# Altium integrated library VIETTIEN.IntLib: 194 symbols (part 8 of 9)

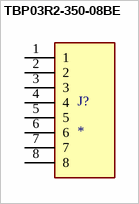
[diagram p161: symbol TBP03R2-350-08BE]

## TBP03R2-350-08BE
designator J?
2~24 Poles, Pluggable, Receptacle, Vertical, 3.50 Pitch, Terminal Block Connector; MF: Same Sky; MP: TBP03R2-350-08BE; SnapEDA_Link: https://www.snapeda.com/parts/TBP03R2-350-08BE/Same+Sky/view-part/?ref=snap; Package: None; Value: *; Check_prices: https://www.snapeda.com/parts/TBP03R2-350-08BE/Same+Sky/view-part/?ref=eda
footprint CUI_TBP03R2-350-08BE
pins: 1, 2, 3, 4, 5, 6, 7, 8


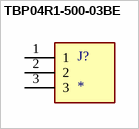
[diagram p162: symbol TBP04R1-500-03BE]

## TBP04R1-500-03BE
designator J?
Terminal Block - Domino - 3 pin; MF: Same Sky; MP: TBP04R1-500-03BE; SnapEDA_Link: https://www.snapeda.com/parts/TBP04R1-500-03BE/Same+Sky/view-part/?ref=snap; Package: None; Value: *; Check_prices: https://www.snapeda.com/parts/TBP04R1-500-03BE/Same+Sky/view-part/?ref=eda
footprint CUI_TBP04R1-500-03BE
pins: 1, 2, 3


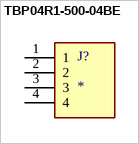
[diagram p163: symbol TBP04R1-500-04BE]

## TBP04R1-500-04BE
designator J?
2~24 Poles, Pluggable, Receptacle, Horizontal, 5.0 Pitch, Terminal Block Connector; MF: Same Sky; MP: TBP04R1-500-04BE; SnapEDA_Link: https://www.snapeda.com/parts/TBP04R1-500-04BE/Same+Sky/view-part/?ref=snap; Package: None; Value: *; Check_prices: https://www.snapeda.com/parts/TBP04R1-500-04BE/Same+Sky/view-part/?ref=eda
footprint CUI_TBP04R1-500-04BE
pins: 1, 2, 3, 4


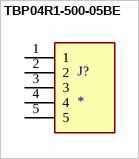
[diagram p164: symbol TBP04R1-500-05BE]

## TBP04R1-500-05BE
designator J?
2~24 Poles, Pluggable, Receptacle, Horizontal, 5.0 Pitch, Terminal Block Connector; MF: Same Sky; MP: TBP04R1-500-05BE; SnapEDA_Link: https://www.snapeda.com/parts/TBP04R1-500-05BE/Same+Sky/view-part/?ref=snap; Package: None; Value: *; Check_prices: https://www.snapeda.com/parts/TBP04R1-500-05BE/Same+Sky/view-part/?ref=eda
footprint CUI_TBP04R1-500-05BE
pins: 1, 2, 3, 4, 5


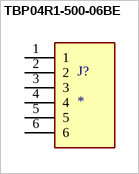
[diagram p165: symbol TBP04R1-500-06BE]

## TBP04R1-500-06BE
designator J?
2~24 Poles, Pluggable, Receptacle, Horizontal, 5.0 Pitch, Terminal Block Connector; MF: Same Sky; MP: TBP04R1-500-06BE; SnapEDA_Link: https://www.snapeda.com/parts/TBP04R1-500-06BE/Same+Sky/view-part/?ref=snap; Package: None; Value: *; Check_prices: https://www.snapeda.com/parts/TBP04R1-500-06BE/Same+Sky/view-part/?ref=eda
footprint CUI_TBP04R1-500-06BE
pins: 1, 2, 3, 4, 5, 6


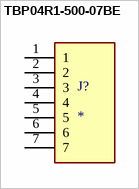
[diagram p166: symbol TBP04R1-500-07BE]

## TBP04R1-500-07BE
designator J?
2~24 Poles, Pluggable, Receptacle, Horizontal, 5.0 Pitch, Terminal Block Connector; MF: Same Sky; MP: TBP04R1-500-07BE; SnapEDA_Link: https://www.snapeda.com/parts/TBP04R1-500-07BE/Same+Sky/view-part/?ref=snap; Package: None; Value: *; Check_prices: https://www.snapeda.com/parts/TBP04R1-500-07BE/Same+Sky/view-part/?ref=eda
footprint CUI_TBP04R1-500-07BE
pins: 1, 2, 3, 4, 5, 6, 7


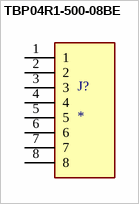
[diagram p167: symbol TBP04R1-500-08BE]

## TBP04R1-500-08BE
designator J?
2~24 Poles, Pluggable, Receptacle, Horizontal, 5.0 Pitch, Terminal Block Connector; MF: Same Sky; MP: TBP04R1-500-08BE; SnapEDA_Link: https://www.snapeda.com/parts/TBP04R1-500-08BE/Same+Sky/view-part/?ref=snap; Package: None; Value: *; Check_prices: https://www.snapeda.com/parts/TBP04R1-500-08BE/Same+Sky/view-part/?ref=eda
footprint CUI_TBP04R1-500-08BE
pins: 1, 2, 3, 4, 5, 6, 7, 8


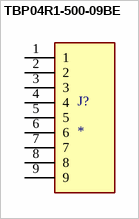
[diagram p168: symbol TBP04R1-500-09BE]

## TBP04R1-500-09BE
designator J?
2~24 Poles, Pluggable, Receptacle, Horizontal, 5.0 Pitch, Terminal Block Connector; MF: Same Sky; MP: TBP04R1-500-09BE; SnapEDA_Link: https://www.snapeda.com/parts/TBP04R1-500-09BE/Same+Sky/view-part/?ref=snap; Package: None; Value: *; Check_prices: https://www.snapeda.com/parts/TBP04R1-500-09BE/Same+Sky/view-part/?ref=eda
footprint CUI_TBP04R1-500-09BE
pins: 1, 2, 3, 4, 5, 6, 7, 8, 9


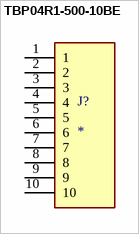
[diagram p169: symbol TBP04R1-500-10BE]

## TBP04R1-500-10BE
designator J?
2~24 Poles, Pluggable, Receptacle, Horizontal, 5.0 Pitch, Terminal Block Connector; MF: Same Sky; MP: TBP04R1-500-10BE; SnapEDA_Link: https://www.snapeda.com/parts/TBP04R1-500-10BE/Same+Sky/view-part/?ref=snap; Package: None; Value: *; Check_prices: https://www.snapeda.com/parts/TBP04R1-500-10BE/Same+Sky/view-part/?ref=eda
footprint CUI_TBP04R1-500-10BE
pins: 1, 2, 3, 4, 5, 6, 7, 8, 9, 10


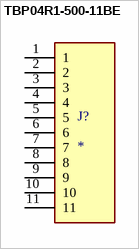
[diagram p170: symbol TBP04R1-500-11BE]

## TBP04R1-500-11BE
designator J?
2~24 Poles, Pluggable, Receptacle, Horizontal, 5.0 Pitch, Terminal Block Connector; MF: Same Sky; MP: TBP04R1-500-11BE; SnapEDA_Link: https://www.snapeda.com/parts/TBP04R1-500-11BE/Same+Sky/view-part/?ref=snap; Package: None; Value: *; Check_prices: https://www.snapeda.com/parts/TBP04R1-500-11BE/Same+Sky/view-part/?ref=eda
footprint CUI_TBP04R1-500-11BE
pins: 1, 2, 3, 4, 5, 6, 7, 8, 9, 10, 11


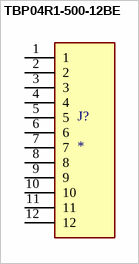
[diagram p171: symbol TBP04R1-500-12BE]

## TBP04R1-500-12BE
designator J?
2~24 Poles, Pluggable, Receptacle, Horizontal, 5.0 Pitch, Terminal Block Connector; MF: Same Sky; MP: TBP04R1-500-12BE; SnapEDA_Link: https://www.snapeda.com/parts/TBP04R1-500-12BE/Same+Sky/view-part/?ref=snap; Package: None; Value: *; Check_prices: https://www.snapeda.com/parts/TBP04R1-500-12BE/Same+Sky/view-part/?ref=eda
footprint CUI_TBP04R1-500-12BE
pins: 1, 2, 3, 4, 5, 6, 7, 8, 9, 10, 11, 12


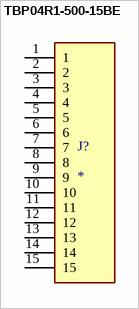
[diagram p172: symbol TBP04R1-500-15BE]

## TBP04R1-500-15BE
designator J?
2~24 Poles, Pluggable, Receptacle, Horizontal, 5.0 Pitch, Terminal Block Connector; MF: Same Sky; MP: TBP04R1-500-15BE; SnapEDA_Link: https://www.snapeda.com/parts/TBP04R1-500-15BE/Same+Sky/view-part/?ref=snap; Package: None; Value: *; Check_prices: https://www.snapeda.com/parts/TBP04R1-500-15BE/Same+Sky/view-part/?ref=eda
footprint CUI_TBP04R1-500-15BE
pins: 1, 2, 3, 4, 5, 6, 7, 8, 9, 10, 11, 12, 13, 14, 15


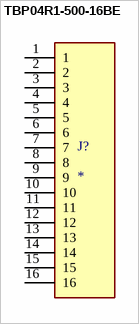
[diagram p173: symbol TBP04R1-500-16BE]

## TBP04R1-500-16BE
designator J?
2~24 Poles, Pluggable, Receptacle, Horizontal, 5.0 Pitch, Terminal Block Connector; MF: Same Sky; MP: TBP04R1-500-16BE; SnapEDA_Link: https://www.snapeda.com/parts/TBP04R1-500-16BE/Same+Sky/view-part/?ref=snap; Package: None; Value: *; Check_prices: https://www.snapeda.com/parts/TBP04R1-500-16BE/Same+Sky/view-part/?ref=eda
footprint CUI_TBP04R1-500-16BE
pins: 1, 2, 3, 4, 5, 6, 7, 8, 9, 10, 11, 12, 13, 14, 15, 16


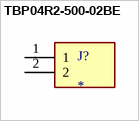
[diagram p174: symbol TBP04R2-500-02BE]

## TBP04R2-500-02BE
designator J?
2~24 Poles, Pluggable, Receptacle, Vertical, 5.0 Pitch, Terminal Block Connector; MF: Same Sky; MP: TBP04R2-500-02BE; SnapEDA_Link: https://www.snapeda.com/parts/TBP04R2-500-02BE/Same+Sky/view-part/?ref=snap; Package: None; Value: *; Check_prices: https://www.snapeda.com/parts/TBP04R2-500-02BE/Same+Sky/view-part/?ref=eda
footprint CUI_TBP04R2-500-02BE
pins: 1, 2


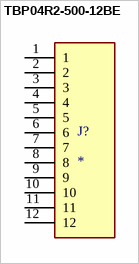
[diagram p175: symbol TBP04R2-500-12BE]

## TBP04R2-500-12BE
designator J?
2~24 Poles, Pluggable, Receptacle, Vertical, 5.0 Pitch, Terminal Block Connector; MF: Same Sky; MP: TBP04R2-500-12BE; SnapEDA_Link: https://www.snapeda.com/parts/TBP04R2-500-12BE/Same+Sky/view-part/?ref=snap; Package: None; Value: *; Check_prices: https://www.snapeda.com/parts/TBP04R2-500-12BE/Same+Sky/view-part/?ref=eda
footprint CUI_TBP04R2-500-12BE
pins: 1, 2, 3, 4, 5, 6, 7, 8, 9, 10, 11, 12


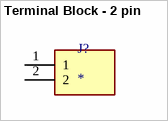
[diagram p176: symbol Terminal Block - 2 pin]

## Terminal Block - 2 pin
designator J?
Terminal Block - Domino - 2 pin; MF: Same Sky; MP: TBP04R1-500-02BE; SnapEDA_Link: https://www.snapeda.com/parts/TBP04R1-500-02BE/Same+Sky/view-part/?ref=snap; Package: None; Value: *; Check_prices: https://www.snapeda.com/parts/TBP04R1-500-02BE/Same+Sky/view-part/?ref=eda
footprint CUI_TBP04R1-500-02BE
pins: 1, 2


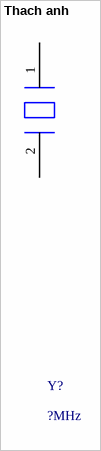
[diagram p177: symbol Thach anh]

## Thach anh
designator Y?, comment ?MHz
Crystal For all Crystal 2pin.
footprint CRY_HC_49_S
pins: 1, 2


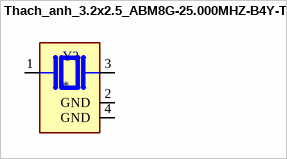
[diagram p178: symbol Thach_anh_3.2x2.5_ABM8G-25.000MHZ-B4Y-T]

## Thach_anh_3.2x2.5_ABM8G-25.000MHZ-B4Y-T
designator Y?
25 MHz Â±30ppm Crystal 10pF 60 Ohms 4-SMD, No Lead / ABM8G-25.000MHZ-B4Y-T; MF: Abracon; Value: *; SnapEDA_Link: https://www.snapeda.com/parts/ABM8G-25.000MHZ-B4Y-T/Abracon+LLC/view-part/?ref=snap; MP: ABM8G-25.000MHZ-B4Y-T; Check_prices: https://www.snapeda.com/parts/ABM8G-25.000MHZ-B4Y-T/Abracon+LLC/view-part/?ref=eda; Availability: In Stock; Price: None; Purchase-URL: https://pricing.snapeda.com/search/part/ABM8G-25.000MHZ-B4Y-T/?ref=eda; Package: SMD-4 Abracon
footprint XTAL_ABM8G-25.000MHZ-B4Y-T
pins: 1, 2 GND (power), 3 2, 4 GND (power)


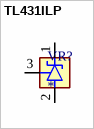
[diagram p179: symbol TL431ILP]

## TL431ILP
designator VR?
MP: TL431ILP; Package: None; Price: None; Value: *; Availability: Unavailable
footprint VREG_TL431ILP
pins: 1 CATHODE, 2 ANODE, 3 REF


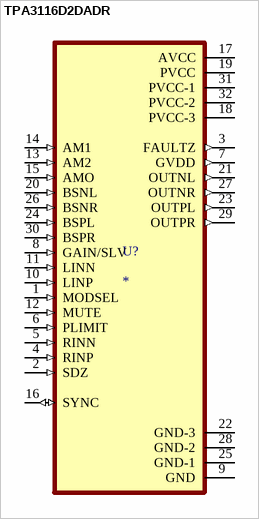
[diagram p180: symbol TPA3116D2DADR]

## TPA3116D2DADR
designator U?
50-W stereo, 100-W mono, 4.5- to 26-V supply, analog input Class-D audio amplifier w/ SpeakerGuard™; MF: Texas Instruments; MP: TPA3116D2DADR; SnapEDA_Link: https://www.snapeda.com/parts/TPA3116D2DADR/Texas+Instruments/view-part/?ref=snap; Package: HTSSOP-32 Texas Instruments; Value: *; Check_prices: https://www.snapeda.com/parts/TPA3116D2DADR/Texas+Instruments/view-part/?ref=eda
footprint SOP65P810X115-33N
pins: 1 MODSEL (in), 2 SDZ (in), 3 FAULTZ (out), 4 RINP (in), 5 RINN (in), 6 PLIMIT (in), 7 GVDD (out), 8 GAIN/SLV (in), 9 GND (power), 10 LINP (in), 11 LINN (in), 12 MUTE (in), 13 AM2 (in), 14 AM1 (in), 15 AMO (in), 16 SYNC (io), 17 AVCC (power), 18 PVCC-3 (power), 19 PVCC (power), 20 BSNL (in), 21 OUTNL (out), 22 GND-3 (power), 23 OUTPL (out), 24 BSPL (in), 25 GND-1 (power), 26 BSNR (in), 27 OUTNR (out), 28 GND-2 (power), 29 OUTPR (out), 30 BSPR (in), 31 PVCC-1 (power), 32 PVCC-2 (power)


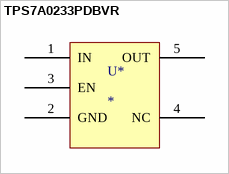
[diagram p181: symbol TPS7A0233PDBVR]

## TPS7A0233PDBVR
designator U*
200mA, nanopower-IQ (25 nA), low-dropout (LDO) voltage regulator with enable
footprint SOT95P280X145-5N
pins: 1 IN, 2 GND, 3 EN, 4 NC, 5 OUT


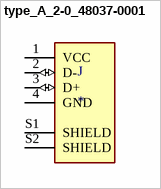
[diagram p182: symbol type_A_2-0_48037-0001]

## type_A_2-0_48037-0001
designator J
USB-A _USB TYPE-A_ USB 2.0 Plug Connector 4 Position Through Hole, Right Angle / 48037-0001; MF: Molex; Package: None; Price: None; SnapEDA_Link: https://www.snapeda.com/parts/48037-0001/Molex/view-part/49135/?ref=snap; Availability: Unavailable; Value: *; MP: 48037-0001
footprint MOLEX_48037-0001
pins: 1 VCC (power), 2 D- (io), 3 D+ (io), 4 GND (power), S1 SHIELD, S2 SHIELD


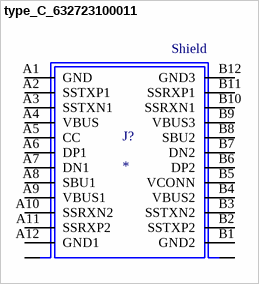
[diagram p183: symbol type_C_632723100011]

## type_C_632723100011
designator J?
632723100011 USB 3.1 Horizontal Receptacle THR/SMT; MF: {'manufacturer': u'Wurth Electronics'}; Package: None; Price: None; Value: *; MP: 632723100011; Availability: Unavailable
footprint 632723100011
pins: A1 GND, A2 SSTXP1, A3 SSTXN1, A4 VBUS, A5 CC, A6 DP1, A7 DN1, A8 SBU1, A9 VBUS1, A10 SSRXN2, A11 SSRXP2, A12 GND1, B1 GND2, B2 SSTXP2, B3 SSTXN2, B4 VBUS2, B5 VCONN, B6 DP2, B7 DN2, B8 SBU2, B9 VBUS3, B10 SSRXN1, B11 SSRXP1, B12 GND3, GND SHIELD, GND1 SHIELD, S1 SHIELD1, S2 SHIELD1, S3 SHIELD1, S4 SHIELD1
text: Shield
